# Altium schematic symbol library stm32-electronic-dice.SchLib: 12 symbols
Pins are listed as number, name and electrical type; pins without a type are passive.

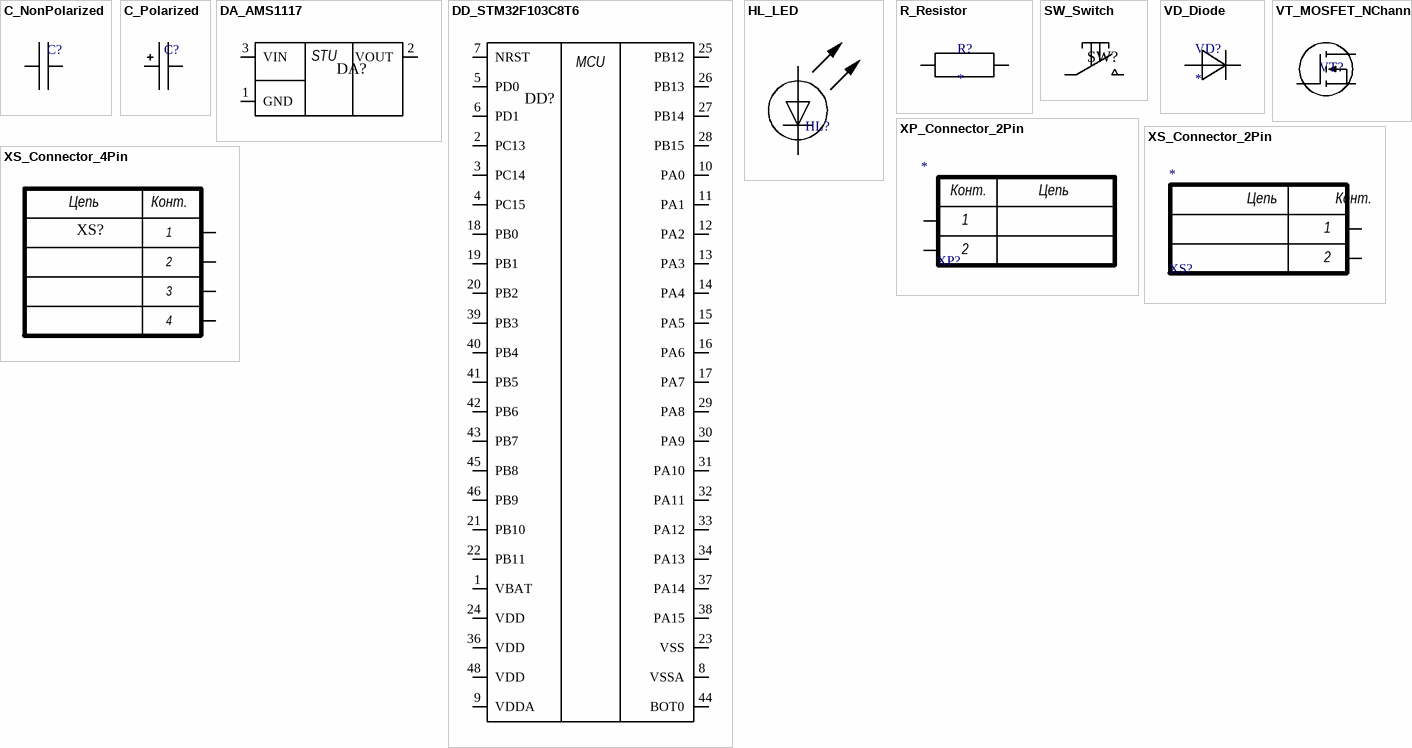
[diagram p0: symbols C_NonPolarized to XS_Connector_4Pin]

## C_NonPolarized
designator C?
Non-polarized capacitor
footprint C_KM5B_1000 (PCB footprint for KM5B capacitor)
footprint C_MLCC (Multilayer ceramic capacitor footprint)
pins: 1, 2

## C_Polarized
designator C?
Polarized capacitor
footprint C_KM50-35 (PCB footprint for KM50-35 capacitor)
pins: 1, 2

## DA_AMS1117
designator DA?, comment AMS1117  (value not drawn)
Linear voltage regulator, AMS1117 series
footprint DA_SOT-223
pins: 1 GND, 2 VOUT, 3 VIN
text: STU

## DD_STM32F103C8T6
designator DD?, comment STM32F103C8T6  (value not drawn)
STM32F103C8T6 microcontroller, LQFP-48 package
footprint DD_LQFP-48
pins: 1 VBAT, 2 PC13, 3 PC14, 4 PC15, 5 PD0, 6 PD1, 7 NRST, 8 VSSA, 9 VDDA, 10 PA0, 11 PA1, 12 PA2, 13 PA3, 14 PA4, 15 PA5, 16 PA6, 17 PA7, 18 PB0, 19 PB1, 20 PB2, 21 PB10, 22 PB11, 23 VSS, 24 VDD, 25 PB12, 26 PB13, 27 PB14, 28 PB15, 29 PA8, 30 PA9, 31 PA10, 32 PA11, 33 PA12, 34 PA13, 36 VDD, 37 PA14, 38 PA15, 39 PB3, 40 PB4, 41 PB5, 42 PB6, 43 PB7, 44 BOT0, 45 PB8, 46 PB9, 48 VDD
text: MCU

## HL_LED
designator HL?  (value not drawn)
Light-emitting diode (LED)
footprint HL_LED
pins: 1, 2

## R_Resistor
designator R?
Fixed resistor; Value: *
footprint R_CF-25_C1-4 (PCB footprint for CF-25 / C1-4 resistor)
pins: 1, 2

## SW_Switch
designator SW?  (value not drawn)
Switch
footprint SW_Button
pins: 1, 2

## VD_Diode
designator VD?
Diode
footprint VD_1N4148
pins: 1, 2

## VT_MOSFET_NChannel
designator VT?  (value not drawn)
N-channel MOSFET
footprint VT_TO-92
pins: 1 И, 2 З, 3 С

## XP_Connector_2Pin
designator XP?
2-pin connector (plug); Value: *
footprint X_2Pin_5.0mm (2-pin connector footprint)
pins: 1, 2
text: Конт.; Цепь

## XS_Connector_2Pin
designator XS?
2-pin connector (socket); Value: *
footprint X_2Pin_5.0mm (2-pin connector footprint)
pins: 1, 2
text: Цепь; Конт.

## XS_Connector_4Pin
designator XS?  (value not drawn)
4-pin connector (socket)
pins: 1, 2, 3, 4
text: Цепь; Конт.